# EAGLE library part 6211XX284621_621112284621 (library WR-PHD)
WR-PHD 2.00 mm Dual SMT Socket Header Angled Article Properties Pins 4 unitless; 6 unitless; 8 unitless; 10 unitless; 12 unitless; 14 unitless; 16 unitless; 20 unitless General Information Operating Temperature -40 °C up to +105 °C Compliance Lead free / RoHS Pitch 2 mm Durability 50 Cycles Rows Dual Gender Socket Header Type Angled; Straight Material Properties Insulator Material LCP Insulator Flammability Rating UL94 V-0 Contact Material Copper Alloy Contact Plating Gold Contact Type Stamped Certification UL Approval E323964 Packaging Properties Packaging Tape and Reel Electrical Properties IR 2 A Withstanding Voltage 500 V (AC) Contact Resistance 20 mΩ RISO 1000 MΩ <https://www.we-online.com/components/media/o106797v209%20Family_WR-PHD_6211xx284621.jpg> Details see: www.we-online.com/en/components/products/PHD_2_00_SMT_ANGLED_DUAL_SOCKET_HEADER_6211XX284621 <www.we-online.com/en/components/products/PHD_2_00_SMT_ANGLED_DUAL_SOCKET_HEADER_6211XX284621/?utm_source=eagle_model&utm_medium=description_link&utm_campaign=eisos_eagle> Updated by Ella 2024-01-31 2024 (C) Würth Elektronik
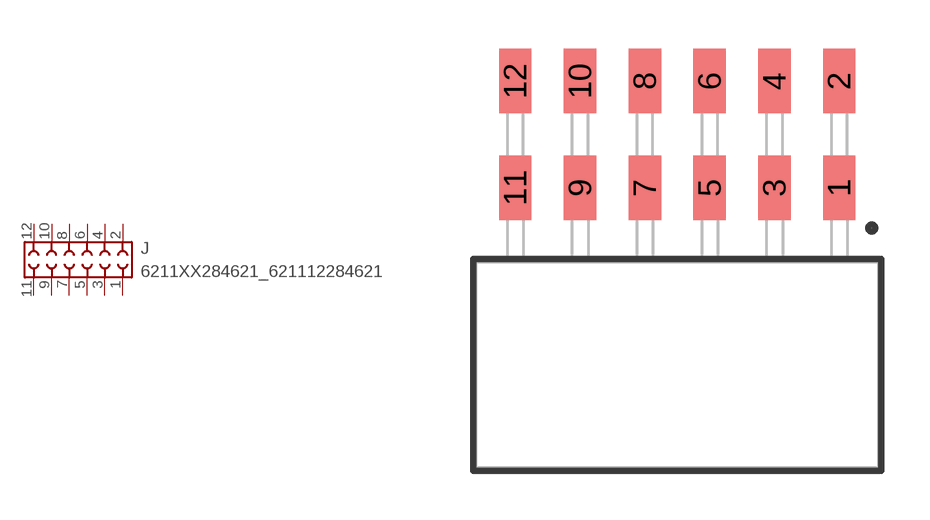
[diagram p392: symbol with the pads of 621112284621; footprint 621112284621]

Designator prefix J

## 6211XX284621_621112284621 (DATASHEET-URL: https://www.we-online.com/redexpert/spec/621112284621?ae; GENDER: Socket Header; IR: 2A; MOUNT: SMT; PACKAGING: Tape and Reel; PART-NUMBER: 621112284621; PINS: 12; PITCH: 2.00 mm; ROWS: Dual; TYPE: Angled; VALUE: 621112284621)  [621112284621]
1  1  pas
2  2  pas
3  3  pas
4  4  pas
5  5  pas
6  6  pas
7  7  pas
8  8  pas
9  9  pas
10  10  pas
11  11  pas
12  12  pas

## Footprint 621112284621 (pad centres in mm)
WR-PHD 2.00 mm Dual SMT Socket Header Angled,12 Pins
smd 1 x 2: 1 5,5.475; 2 5,8.775; 3 3,5.475; 4 3,8.775; 5 1,5.475; 6 1,8.775; 7 -1,5.475; 8 -1,8.775; 9 -3,5.475; 10 -3,8.775; 11 -5,5.475; 12 -5,8.775